# Altium footprint library PcbLib1.PcbLib: 36 footprints (part 3 of 3)
Each footprint in its own frame and in the unit in brackets; x right, y up, seen from the top. Pads: shape width x height; smd on the part's side, far side on the other; paste and mask are expansions set on the pad; w line width, h text height; cw(c..) or ccw(c..) is an arc to the next point about the centre after c.
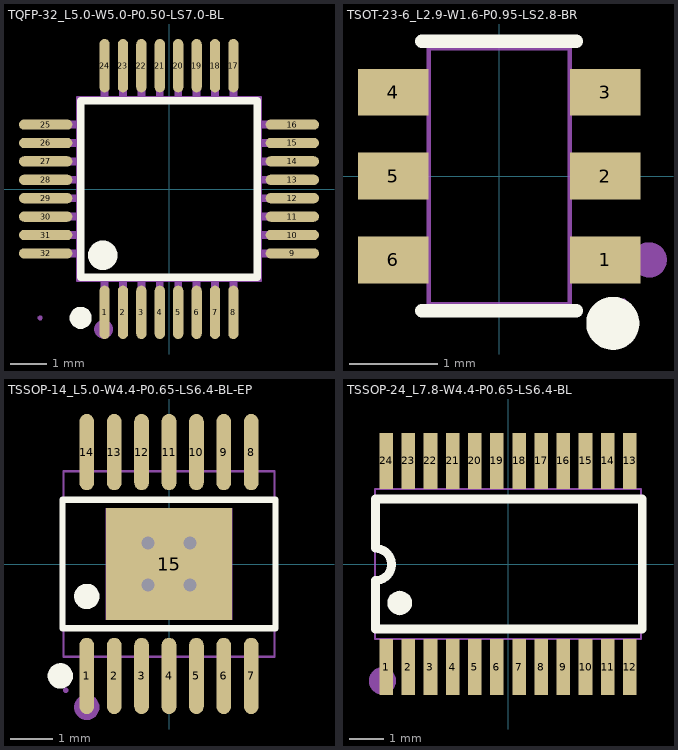
[diagram p2: the footprints below, top view; thin cyan lines are the x and y axes]

## TQFP-32_L5.0-W5.0-P0.50-LS7.0-BL [mm]
pads (32):
  oval 0.28x1.45 smd: 1(-1.75,-3.35) 2(-1.25,-3.35) 3(-0.75,-3.35) 4(-0.25,-3.35) 5(0.25,-3.35) 6(0.75,-3.35) 7(1.25,-3.35) 8(1.75,-3.35) 17(1.75,3.35) 18(1.25,3.35) 19(0.75,3.35) 20(0.25,3.35) 21(-0.25,3.35) 22(-0.75,3.35) 23(-1.25,3.35) 24(-1.75,3.35)
  oval 1.45x0.28 smd: 9(3.35,-1.75) 10(3.35,-1.25) 11(3.35,-0.75) 12(3.35,-0.25) 13(3.35,0.25) 14(3.35,0.75) 15(3.35,1.25) 16(3.35,1.75) 25(-3.35,1.75) 26(-3.35,1.25) 27(-3.35,0.75) 28(-3.35,0.25) 29(-3.35,-0.25) 30(-3.35,-0.75) 31(-3.35,-1.25) 32(-3.35,-1.75)
Top Overlay:
  lines w0.2: -2.4,-2.4 2.4,-2.4 2.4,2.4 -2.4,2.4 -2.4,-2.4
  lines w0.3: -2.4,-3.35 ccw(c-2.399,-3.5) -2.398,-3.35
  lines w0.4: -1.801,-1.6 ccw(c-1.798,-1.8) -1.796,-1.6
Mechanical 2:
  circle w0.254: c-1.778,-3.81 r0.127
Mechanical 6:
  lines w0.051: -2.5,-2.5 2.5,-2.5 2.5,2.5 -2.5,2.5 -2.5,-2.5
Mechanical 7:
  drawing of 32 lines, arcs and shapes, not listed
Mechanical 8:
  region: -3.44,-3.5 -3.44,-3.525 -3.475,-3.56 -3.525,-3.56 -3.56,-3.525 -3.56,-3.5 -3.56,-3.475 -3.525,-3.44 -3.475,-3.44 -3.44,-3.475 -3.44,-3.5
Mechanical 9:
  drawing of 32 lines, arcs and shapes, not listed

## TSOT-23-6_L2.9-W1.6-P0.95-LS2.8-BR [mm]
pads (6):
  rect 0.8x0.532 smd: 1(1.2,-0.95) 2(1.2,0) 3(1.2,0.95) 4(-1.2,0.95) 5(-1.2,0) 6(-1.2,-0.95)
Top Overlay:
  circle w0.3: c1.287,-1.669 r0.15
  lines w0.152: -0.876,-1.526 0.876,-1.526 ; -0.876,1.526 0.876,1.526
Mechanical 2:
  circle w0.2: c1.7,-0.95 r0.1
Mechanical 6:
  lines w0.051: -0.8,-1.45 0.8,-1.45 0.8,1.45 -0.8,1.45 -0.8,-1.45
Mechanical 7:
  region: -0.96,-1.15 -0.96,-0.75 -0.79,-0.75 -0.79,-1.15
  region: -0.96,-0.2 -0.96,0.2 -0.79,0.2 -0.79,-0.2
  region: -0.96,0.75 -0.96,1.15 -0.79,1.15 -0.79,0.75
  region: 0.79,0.75 0.79,1.15 0.96,1.15 0.96,0.75
  region: 0.79,-0.2 0.79,0.2 0.96,0.2 0.96,-0.2
  region: 0.79,-1.15 0.79,-0.75 0.96,-0.75 0.96,-1.15
Mechanical 8:
  region: 1.46,-1.45 1.46,-1.475 1.425,-1.51 1.375,-1.51 1.34,-1.475 1.34,-1.45 1.34,-1.425 1.375,-1.39 1.425,-1.39 1.46,-1.425 1.46,-1.45
Mechanical 9:
  region: -0.95,-1.15 -0.95,-0.75 -1.4,-0.75 -1.4,-1.15
  region: -0.95,-0.2 -0.95,0.2 -1.4,0.2 -1.4,-0.2
  region: -0.95,0.75 -0.95,1.15 -1.4,1.15 -1.4,0.75
  region: 0.95,0.75 0.95,1.15 1.4,1.15 1.4,0.75
  region: 0.95,-0.2 0.95,0.2 1.4,0.2 1.4,-0.2
  region: 0.95,-1.15 0.95,-0.75 1.4,-0.75 1.4,-1.15

## TSSOP-14_L5.0-W4.4-P0.65-LS6.4-BL-EP [mm]
pads (15):
  oval 0.35x1.809 smd: 1(-1.95,-2.655) 2(-1.3,-2.655) 3(-0.65,-2.655) 4(0,-2.655) 5(0.65,-2.655) 6(1.3,-2.655) 7(1.95,-2.655) 8(1.95,2.655) 9(1.3,2.655) 10(0.65,2.655) 11(0,2.655) 12(-0.65,2.655) 13(-1.3,2.655) 14(-1.95,2.655)
  rect 3x2.65 smd: 15(0,0)
via 0.495,-0.495 diameter 0.61 hole 0.305
via -0.495,-0.495 diameter 0.61 hole 0.305
via -0.495,0.495 diameter 0.61 hole 0.305
via 0.495,0.495 diameter 0.61 hole 0.305
Top Overlay:
  circle w0.3: c-2.577,-2.655 r0.15
  circle w0.3: c-1.95,-0.769 r0.15
  lines w0.152: -2.526,-1.521 2.526,-1.521 2.526,1.521 -2.526,1.521 -2.526,-1.521
Mechanical 2:
  circle w0.3: c-1.95,-3.4 r0.15
Mechanical 6:
  lines w0.051: -2.5,-2.2 2.5,-2.2 2.5,2.2 -2.5,2.2 -2.5,-2.2
Mechanical 7:
  region: 1.825,2.37 1.825,1.94 2.075,1.94 2.075,2.37
  region: 1.175,2.37 1.175,1.94 1.425,1.94 1.425,2.37
  region: 0.525,2.37 0.525,1.94 0.775,1.94 0.775,2.37
  region: -0.125,2.37 -0.125,1.94 0.125,1.94 0.125,2.37
  region: -0.775,2.37 -0.775,1.94 -0.525,1.94 -0.525,2.37
  region: -1.425,2.37 -1.425,1.94 -1.175,1.94 -1.175,2.37
  region: -2.075,2.37 -2.075,1.94 -1.825,1.94 -1.825,2.37
  region: 1.825,-2.37 1.825,-1.94 2.075,-1.94 2.075,-2.37
  region: 1.175,-2.37 1.175,-1.94 1.425,-1.94 1.425,-2.37
  region: 0.525,-2.37 0.525,-1.94 0.775,-1.94 0.775,-2.37
  region: -0.125,-2.37 -0.125,-1.94 0.125,-1.94 0.125,-2.37
  region: -0.775,-2.37 -0.775,-1.94 -0.525,-1.94 -0.525,-2.37
  region: -1.425,-2.37 -1.425,-1.94 -1.175,-1.94 -1.175,-2.37
  region: -2.075,-2.37 -2.075,-1.94 -1.825,-1.94 -1.825,-2.37
Mechanical 8:
  region: -2.39,-3 -2.39,-3.025 -2.425,-3.06 -2.475,-3.06 -2.51,-3.025 -2.51,-3 -2.51,-2.975 -2.475,-2.94 -2.425,-2.94 -2.39,-2.975 -2.39,-3
Mechanical 9:
  region: -1.5,-1.325 -1.5,1.325 1.5,1.325 1.5,-1.325
  region: 1.825,3 1.825,2.36 2.075,2.36 2.075,3
  region: 1.175,3 1.175,2.36 1.425,2.36 1.425,3
  region: 0.525,3 0.525,2.36 0.775,2.36 0.775,3
  region: -0.125,3 -0.125,2.36 0.125,2.36 0.125,3
  region: -0.775,3 -0.775,2.36 -0.525,2.36 -0.525,3
  region: -1.425,3 -1.425,2.36 -1.175,2.36 -1.175,3
  region: -2.075,3 -2.075,2.36 -1.825,2.36 -1.825,3
  region: 1.825,-3 1.825,-2.36 2.075,-2.36 2.075,-3
  region: 1.175,-3 1.175,-2.36 1.425,-2.36 1.425,-3
  region: 0.525,-3 0.525,-2.36 0.775,-2.36 0.775,-3
  region: -0.125,-3 -0.125,-2.36 0.125,-2.36 0.125,-3
  region: -0.775,-3 -0.775,-2.36 -0.525,-2.36 -0.525,-3
  region: -1.425,-3 -1.425,-2.36 -1.175,-2.36 -1.175,-3
  region: -2.075,-3 -2.075,-2.36 -1.825,-2.36 -1.825,-3

## TSSOP-24_L7.8-W4.4-P0.65-LS6.4-BL [mm]
pads (24):
  rect 0.4x1.65 smd: 1(-3.575,-3.023) 2(-2.925,-3.023) 3(-2.275,-3.023) 4(-1.625,-3.023) 5(-0.975,-3.023) 6(-0.325,-3.023) 7(0.325,-3.023) 8(0.975,-3.023) 9(1.625,-3.023) 10(2.275,-3.023) 11(2.925,-3.023) 12(3.575,-3.023) 13(3.575,3.023) 14(2.925,3.023) 15(2.275,3.023) 16(1.625,3.023) 17(0.975,3.023) 18(0.325,3.023) 19(-0.325,3.023) 20(-0.975,3.023) 21(-1.625,3.023) 22(-2.275,3.023) 23(-2.925,3.023) 24(-3.575,3.023)
Top Overlay:
  region: -3.529,-1.143 -3.52,-1.064 -3.494,-0.989 -3.452,-0.922 -3.396,-0.866 -3.329,-0.824 -3.254,-0.798 -3.175,-0.789 -3.096,-0.798 -3.021,-0.824 -2.954,-0.866 -2.898,-0.922 -2.856,-0.989 -2.83,-1.064 -2.821,-1.143 -2.83,-1.222 -2.856,-1.297 -2.898,-1.364 -2.954,-1.42 -3.021,-1.462 -3.096,-1.488 -3.175,-1.497 -3.254,-1.488 -3.329,-1.462 -3.396,-1.42 -3.452,-1.364 -3.494,-1.297 -3.52,-1.222
  lines w0.254: -3.886,0.457 cw(c-3.886,-0.013) -3.886,-0.483 -3.886,-1.753 -3.886,-1.905 3.937,-1.905 3.937,1.905 -3.886,1.905 -3.886,1.753 -3.886,0.483
Mechanical 2:
  circle w0.4: c-3.683,-3.429 r0.2
Mechanical 6:
  lines w0.051: -3.9,-2.2 -3.9,2.2 3.9,2.2 3.9,-2.2 -3.9,-2.2
Mechanical 7:
  region: -0.225,2.588 -0.425,2.588 -0.425,2.188 -0.225,2.188
  region: -0.875,2.588 -1.075,2.588 -1.075,2.188 -0.875,2.188
  region: -1.525,2.588 -1.725,2.588 -1.725,2.188 -1.525,2.188
  region: -2.175,2.588 -2.375,2.588 -2.375,2.188 -2.175,2.188
  region: -2.825,2.588 -3.025,2.588 -3.025,2.188 -2.825,2.188
  region: -3.475,2.588 -3.675,2.588 -3.675,2.188 -3.475,2.188
  region: 3.675,2.588 3.475,2.588 3.475,2.188 3.675,2.188
  region: 3.025,2.588 2.825,2.588 2.825,2.188 3.025,2.188
  region: 2.375,2.588 2.175,2.588 2.175,2.188 2.375,2.188
  region: 1.725,2.588 1.525,2.588 1.525,2.188 1.725,2.188
  region: 1.075,2.588 0.875,2.588 0.875,2.188 1.075,2.188
  region: 0.425,2.588 0.225,2.588 0.225,2.188 0.425,2.188
  region: 0.225,-2.588 0.425,-2.588 0.425,-2.188 0.225,-2.188
  region: 0.875,-2.588 1.075,-2.588 1.075,-2.188 0.875,-2.188
  region: 1.525,-2.588 1.725,-2.588 1.725,-2.188 1.525,-2.188
  region: 2.175,-2.588 2.375,-2.588 2.375,-2.188 2.175,-2.188
  region: 2.825,-2.588 3.025,-2.588 3.025,-2.188 2.825,-2.188
  region: 3.475,-2.588 3.675,-2.588 3.675,-2.188 3.475,-2.188
  region: -3.675,-2.588 -3.475,-2.588 -3.475,-2.188 -3.675,-2.188
  region: -3.025,-2.588 -2.825,-2.588 -2.825,-2.188 -3.025,-2.188
  region: -2.375,-2.588 -2.175,-2.588 -2.175,-2.188 -2.375,-2.188
  region: -1.725,-2.588 -1.525,-2.588 -1.525,-2.188 -1.725,-2.188
  region: -1.075,-2.588 -0.875,-2.588 -0.875,-2.188 -1.075,-2.188
  region: -0.425,-2.588 -0.225,-2.588 -0.225,-2.188 -0.425,-2.188
Mechanical 8:
  region: -3.84,-3.186 -3.84,-3.211 -3.875,-3.246 -3.925,-3.246 -3.96,-3.211 -3.96,-3.186 -3.96,-3.161 -3.925,-3.126 -3.875,-3.126 -3.84,-3.161 -3.84,-3.186
Mechanical 9:
  region: -0.225,2.586 -0.425,2.586 -0.425,3.186 -0.225,3.186
  region: -0.875,2.586 -1.075,2.586 -1.075,3.186 -0.875,3.186
  region: -1.525,2.586 -1.725,2.586 -1.725,3.186 -1.525,3.186
  region: -2.175,2.586 -2.375,2.586 -2.375,3.186 -2.175,3.186
  region: -2.825,2.586 -3.025,2.586 -3.025,3.186 -2.825,3.186
  region: -3.475,2.586 -3.675,2.586 -3.675,3.186 -3.475,3.186
  region: 3.675,2.586 3.475,2.586 3.475,3.186 3.675,3.186
  region: 3.025,2.586 2.825,2.586 2.825,3.186 3.025,3.186
  region: 2.375,2.586 2.175,2.586 2.175,3.186 2.375,3.186
  region: 1.725,2.586 1.525,2.586 1.525,3.186 1.725,3.186
  region: 1.075,2.586 0.875,2.586 0.875,3.186 1.075,3.186
  region: 0.425,2.586 0.225,2.586 0.225,3.186 0.425,3.186
  region: 0.225,-2.586 0.425,-2.586 0.425,-3.186 0.225,-3.186
  region: 0.875,-2.586 1.075,-2.586 1.075,-3.186 0.875,-3.186
  region: 1.525,-2.586 1.725,-2.586 1.725,-3.186 1.525,-3.186
  region: 2.175,-2.586 2.375,-2.586 2.375,-3.186 2.175,-3.186
  region: 2.825,-2.586 3.025,-2.586 3.025,-3.186 2.825,-3.186
  region: 3.475,-2.586 3.675,-2.586 3.675,-3.186 3.475,-3.186
  region: -3.675,-2.586 -3.475,-2.586 -3.475,-3.186 -3.675,-3.186
  region: -3.025,-2.586 -2.825,-2.586 -2.825,-3.186 -3.025,-3.186
  region: -2.375,-2.586 -2.175,-2.586 -2.175,-3.186 -2.375,-3.186
  region: -1.725,-2.586 -1.525,-2.586 -1.525,-3.186 -1.725,-3.186
  region: -1.075,-2.586 -0.875,-2.586 -0.875,-3.186 -1.075,-3.186
  region: -0.425,-2.586 -0.225,-2.586 -0.225,-3.186 -0.425,-3.186